# Altium schematic symbol library SU9VF-05030.SchLib: 1 symbol
Pins are listed as number, name and electrical type; pins without a type are passive.

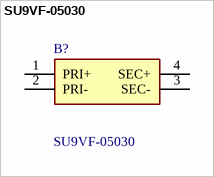
[diagram p0: symbol SU9VF-05030]

## SU9VF-05030
designator B?
Common Mode Filter; Manufacturer_Name: Yageo Group; Geometry.Height: 17mm; Farnell Part Number: *; Farnell Price/Stock: *; Manufacturer_Part_Number: SU9VF-05030; Datasheet Link: https://www.yageogroup.com/content/datasheet/asset/file/KEM_LF0017_SU9VF-9HF
footprint SU9VF05030
pins: 1 PRI+, 2 PRI-, 3 SEC-, 4 SEC+